# Altium footprint library GC9A01.PcbLib: 1 footprints
Each footprint in its own frame and in the unit in brackets; x right, y up, seen from the top. Pads: shape width x height; smd on the part's side, far side on the other; paste and mask are expansions set on the pad; w line width, h text height; cw(c..) or ccw(c..) is an arc to the next point about the centre after c.
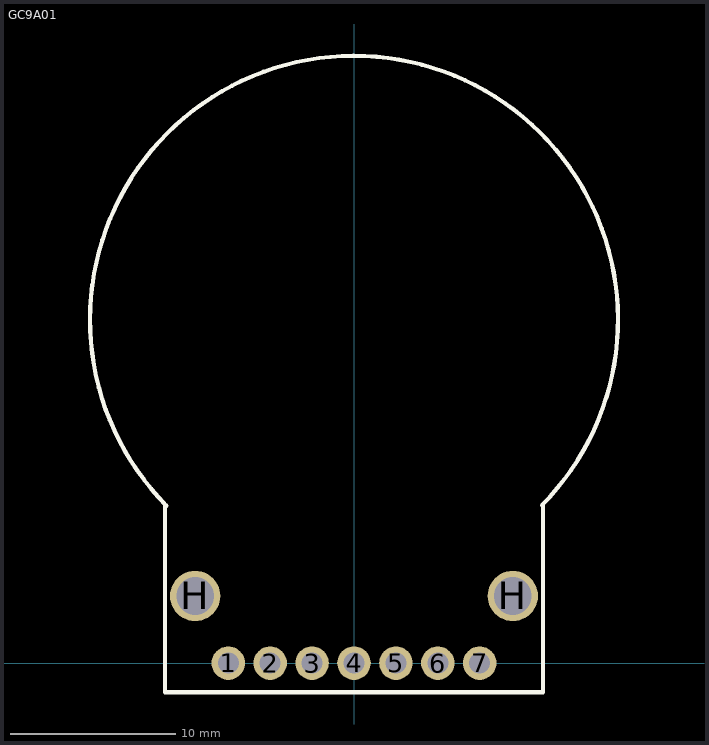
[diagram p0: the footprint, top view; thin cyan lines are the x and y axes]

## GC9A01 [mil] "GC9A01"
pads (9):
  round 80 hole 50: 1(-300,0) 2(-200,0) 3(-100,0) 4(0,0) 5(100,0) 6(200,0) 7(300,0)
  round 120 hole 90: H(-379.13,160.24) H(379.13,160.24)
Top Overlay:
  lines w10: -451.18,376.38 -451.18,-69.29 451.18,-69.29 451.18,376.38 ; -447.05,375.48 cw(c0,819.27) 448.52,376.97